# Altium footprint library FootPrintLib_0.PcbLib: 266 footprints (part 1 of 17)
Each footprint in its own frame and in the unit in brackets; x right, y up, seen from the top. Pads: shape width x height; smd on the part's side, far side on the other; paste and mask are expansions set on the pad; w line width, h text height; cw(c..) or ccw(c..) is an arc to the next point about the centre after c.
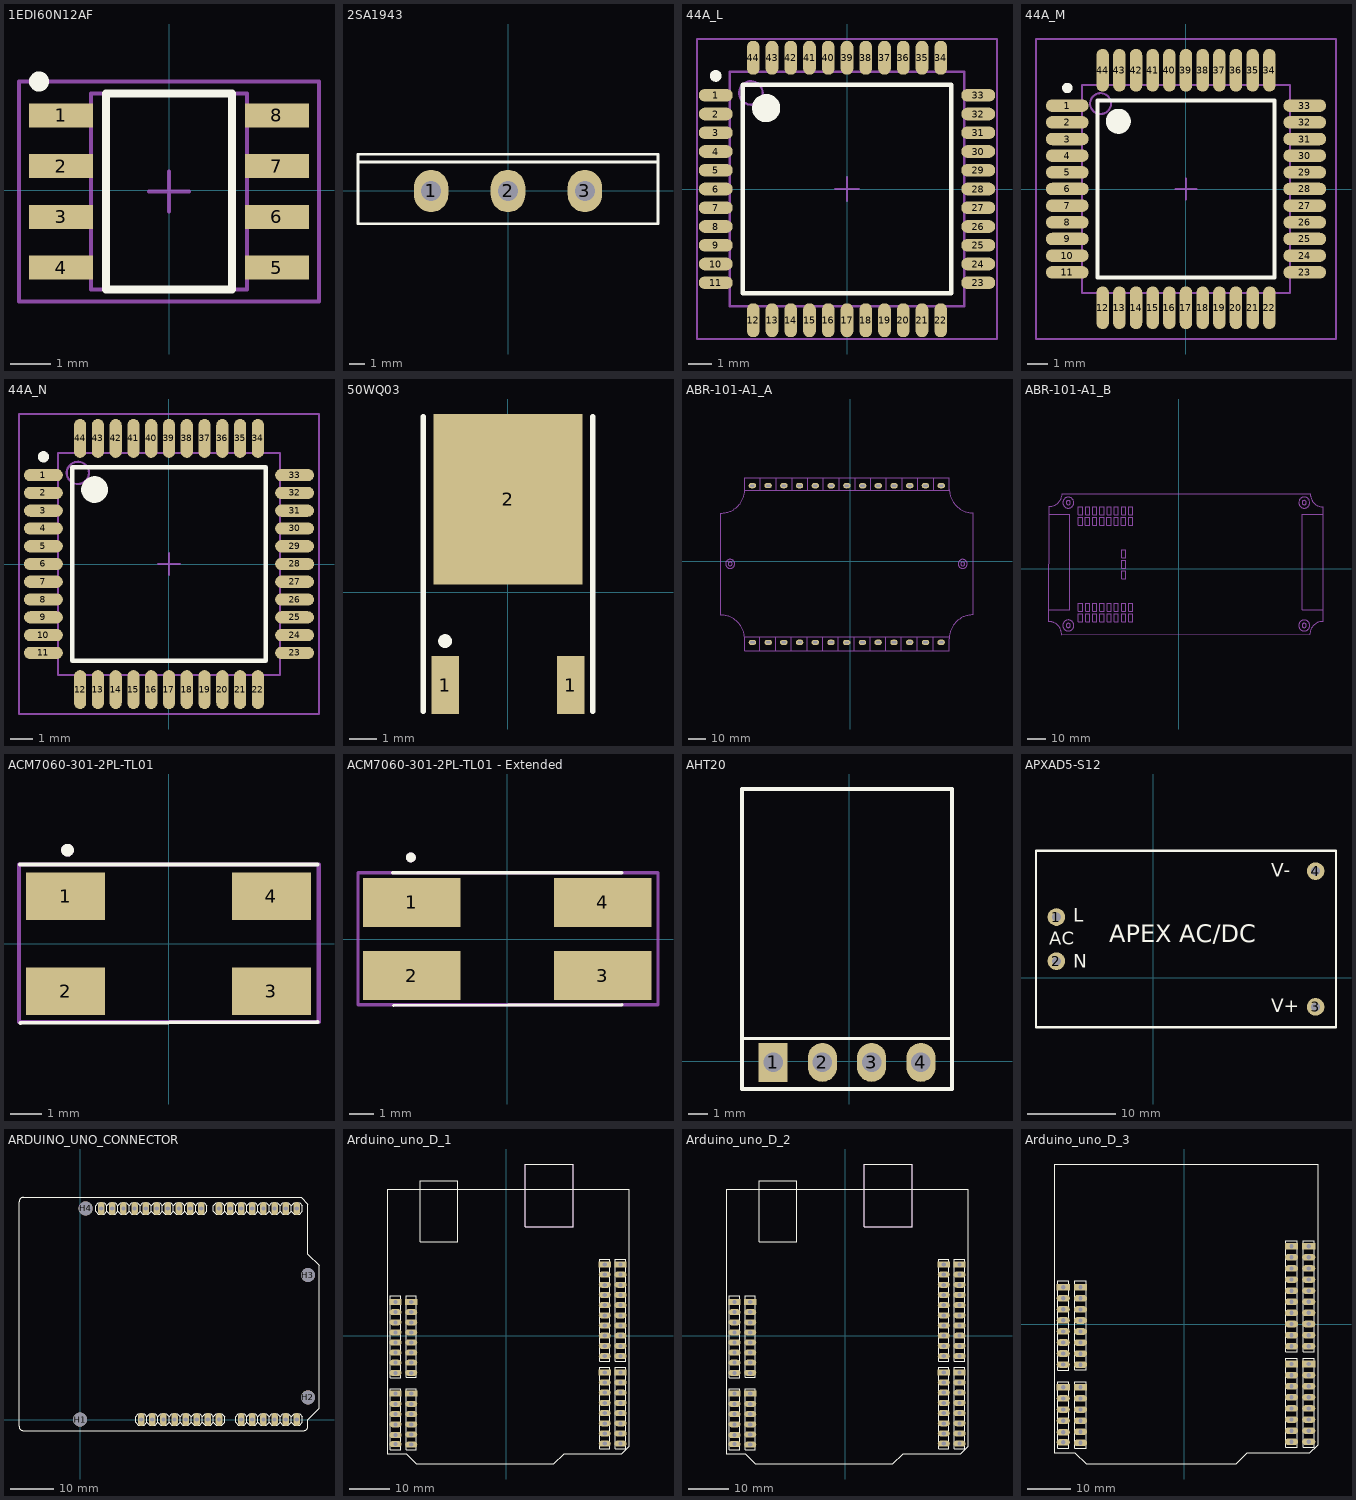
[diagram p0: the footprints below, top view; thin cyan lines are the x and y axes]

## 1EDI60N12AF [mm]
height 1.75
pads (8):
  rect 1.6x0.6 smd paste+0 mask+0: 1(-2.7,1.88) 2(-2.7,0.61) 3(-2.7,-0.66) 4(-2.7,-1.93) 5(2.7,-1.93) 6(2.7,-0.66) 7(2.7,0.61) 8(2.7,1.88)
Top Overlay:
  circle w0.25: c-3.25,2.725 r0.125
  lines w0.2: -1.575,-2.475 -1.575,2.425 1.575,2.425 1.575,-2.475 -1.575,-2.475
Mechanical 13:
  lines w0.1: -1.95,-2.475 -1.95,2.425 1.95,2.425 1.95,-2.475 -1.95,-2.475
Mechanical 15:
  lines w0.1: -0.5,-0.025 0.5,-0.025 ; 0,-0.525 0,0.475 ; -3.75,-2.775 -3.75,2.725 3.75,2.725 3.75,-2.775 -3.75,-2.775
3D body "DSO-8-16.stp": height 1.76, standoff 0, extent -3,-2.525 3,2.475

## 2SA1943 [mil]
pads (3):
  oval 90x110 hole 51.18: 1(-200,0) 2(0,0) 3(200,0)
Top Overlay:
  lines w7: -390,75 390,75 ; -390,-85 -390,95 390,95 390,-85 -390,-85
3D body "User Library-2SA1943.step": height 1445.85, standoff -364.35, extent -401.08,-104.72 406,100

## 44A_L [mm] "Thin QFP, 44-Leads, Body 10x10mm, Pitch 0.8mm, IPC High Density"
height 1.2
pads (44):
  oval 1.45x0.55 smd: 1(-5.6,4) 2(-5.6,3.2) 3(-5.6,2.4) 4(-5.6,1.6) 5(-5.6,0.8) 6(-5.6,0) 7(-5.6,-0.8) 8(-5.6,-1.6) 9(-5.6,-2.4) 10(-5.6,-3.2) 11(-5.6,-4) 23(5.6,-4) 24(5.6,-3.2) 25(5.6,-2.4) 26(5.6,-1.6) 27(5.6,-0.8) 28(5.6,0) 29(5.6,0.8) 30(5.6,1.6) 31(5.6,2.4) 32(5.6,3.2) 33(5.6,4)
  oval 0.55x1.45 smd: 12(-4,-5.6) 13(-3.2,-5.6) 14(-2.4,-5.6) 15(-1.6,-5.6) 16(-0.8,-5.6) 17(0,-5.6) 18(0.8,-5.6) 19(1.6,-5.6) 20(2.4,-5.6) 21(3.2,-5.6) 22(4,-5.6) 34(4,5.6) 35(3.2,5.6) 36(2.4,5.6) 37(1.6,5.6) 38(0.8,5.6) 39(0,5.6) 40(-0.8,5.6) 41(-1.6,5.6) 42(-2.4,5.6) 43(-3.2,5.6) 44(-4,5.6)
Top Overlay:
  circle w0.25: c-5.6,4.825 r0.125
  circle w0.6: c-3.45,3.45 r0.3
  lines w0.2: -4.45,-4.45 -4.45,4.45 4.45,4.45 4.45,-4.45 -4.45,-4.45
Mechanical 13:
  circle w0.1: c-4.1,4.1 r0.5
  lines w0.1: -5,-5 -5,5 5,5 5,-5 -5,-5
Mechanical 15:
  lines w0.1: -0.5,0 0.5,0 ; 0,-0.5 0,0.5 ; -6.4,-6.4 -6.4,6.4 6.4,6.4 6.4,-6.4 -6.4,-6.4
3D body "User Library-LQFP 44.step": height 2.9, standoff -0.03, extent -6.4,-6.4 6.4,6.4

## 44A_M [mm] "Thin QFP, 44-Leads, Body 10x10mm, Pitch 0.8mm, IPC Low Density"
height 1.2
pads (44):
  oval 2.05x0.6 smd: 1(-5.7,4) 2(-5.7,3.2) 3(-5.7,2.4) 4(-5.7,1.6) 5(-5.7,0.8) 6(-5.7,0) 7(-5.7,-0.8) 8(-5.7,-1.6) 9(-5.7,-2.4) 10(-5.7,-3.2) 11(-5.7,-4) 23(5.7,-4) 24(5.7,-3.2) 25(5.7,-2.4) 26(5.7,-1.6) 27(5.7,-0.8) 28(5.7,0) 29(5.7,0.8) 30(5.7,1.6) 31(5.7,2.4) 32(5.7,3.2) 33(5.7,4)
  oval 0.6x2.05 smd: 12(-4,-5.7) 13(-3.2,-5.7) 14(-2.4,-5.7) 15(-1.6,-5.7) 16(-0.8,-5.7) 17(0,-5.7) 18(0.8,-5.7) 19(1.6,-5.7) 20(2.4,-5.7) 21(3.2,-5.7) 22(4,-5.7) 34(4,5.7) 35(3.2,5.7) 36(2.4,5.7) 37(1.6,5.7) 38(0.8,5.7) 39(0,5.7) 40(-0.8,5.7) 41(-1.6,5.7) 42(-2.4,5.7) 43(-3.2,5.7) 44(-4,5.7)
Top Overlay:
  circle w0.6: c-3.25,3.25 r0.3
  circle w0.25: c-5.7,4.85 r0.125
  lines w0.2: -4.25,-4.25 4.25,-4.25 4.25,4.25 -4.25,4.25 -4.25,-4.25
Mechanical 13:
  circle w0.1: c-4.1,4.1 r0.5
  lines w0.1: -5,-5 5,-5 5,5 -5,5 -5,-5
Mechanical 15:
  lines w0.1: -0.5,0 0.5,0 ; 0,-0.5 0,0.5 ; -7.2,-7.2 7.2,-7.2 7.2,7.2 -7.2,7.2 -7.2,-7.2
3D body "User Library-LQFP 44.step": height 2.9, standoff -0.03, extent -6.425,-6.4 6.375,6.4

## 44A_N [mm] "Thin QFP, 44-Leads, Body 10x10mm, Pitch 0.8mm, IPC Medium Density"
height 1.2
pads (44):
  oval 1.75x0.55 smd: 1(-5.65,4) 2(-5.65,3.2) 3(-5.65,2.4) 4(-5.65,1.6) 5(-5.65,0.8) 6(-5.65,0) 7(-5.65,-0.8) 8(-5.65,-1.6) 9(-5.65,-2.4) 10(-5.65,-3.2) 11(-5.65,-4) 23(5.65,-4) 24(5.65,-3.2) 25(5.65,-2.4) 26(5.65,-1.6) 27(5.65,-0.8) 28(5.65,0) 29(5.65,0.8) 30(5.65,1.6) 31(5.65,2.4) 32(5.65,3.2) 33(5.65,4)
  oval 0.55x1.75 smd: 12(-4,-5.65) 13(-3.2,-5.65) 14(-2.4,-5.65) 15(-1.6,-5.65) 16(-0.8,-5.65) 17(0,-5.65) 18(0.8,-5.65) 19(1.6,-5.65) 20(2.4,-5.65) 21(3.2,-5.65) 22(4,-5.65) 34(4,5.65) 35(3.2,5.65) 36(2.4,5.65) 37(1.6,5.65) 38(0.8,5.65) 39(0,5.65) 40(-0.8,5.65) 41(-1.6,5.65) 42(-2.4,5.65) 43(-3.2,5.65) 44(-4,5.65)
Top Overlay:
  circle w0.25: c-5.65,4.825 r0.125
  circle w0.6: c-3.35,3.35 r0.3
  lines w0.2: -4.35,-4.35 -4.35,4.35 4.35,4.35 4.35,-4.35 -4.35,-4.35
Mechanical 13:
  circle w0.1: c-4.1,4.1 r0.5
  lines w0.1: -5,-5 -5,5 5,5 5,-5 -5,-5
Mechanical 15:
  lines w0.1: -0.5,0 0.5,0 ; 0,-0.5 0,0.5 ; -6.75,-6.75 -6.75,6.75 6.75,6.75 6.75,-6.75 -6.75,-6.75
3D body "User Library-LQFP 44.step": height 2.9, standoff -0.03, extent -6.374,-6.4 6.426,6.4

## 50WQ03 [mm] "D-PAK/TO-252-AA; 3 Leads (1 Cropped); Body 10.1 (inc. leads) x 6.6 mm (LxW max)"
pads (3):
  rect 1x2.1 smd: 1(-2.285,-3.375) 1(2.285,-3.375)
  rect 5.4x6.2 smd: 2(0,3.375)
Top Overlay:
  circle w0.25: c-2.285,-1.775 r0.125
  lines w0.2: -3.085,-4.325 -3.085,6.375 ; 3.085,-4.325 3.085,6.375
3D body "User Library-DPAK-1.step": height 2.39, standoff -0.02, extent -3.27,-4.111 3.27,5.827

## ABR-101-A1_A [mm]
pads (130):
  round 3 hole 1.4: 1(-56.538,43.161) 1(-56.284,43.161) 1(-55.903,43.161) 1(-55.649,43.161) 1(-55.268,43.161) 2(-47.521,43.186) 2(-47.267,43.186) 2(-46.886,43.186) 2(-46.632,43.186) 2(-46.251,43.186) 3(-38.504,43.161) 3(-38.25,43.161) 3(-37.869,43.161) 3(-37.615,43.161) 3(-37.234,43.161) 4(-29.538,43.135) 4(-29.284,43.135) 4(-28.903,43.135) 4(-28.649,43.135) 4(-28.268,43.135) 5(-20.444,43.135) 5(-20.19,43.135) 5(-19.809,43.135) 5(-19.555,43.135) 5(-19.174,43.135) 6(-11.453,43.11) 6(-11.199,43.11) 6(-10.818,43.11) 6(-10.564,43.11) 6(-10.183,43.11) 7(-2.41,43.161) 7(-2.156,43.161) 7(-1.775,43.161) 7(-1.521,43.161) 7(-1.14,43.161) 8(6.556,43.084) 8(6.81,43.084) 8(7.191,43.084) 8(7.445,43.084) 8(7.826,43.084) 9(15.547,43.11) 9(15.801,43.11) 9(16.182,43.11) 9(16.436,43.11) 9(16.817,43.11) 10(24.564,43.087) 10(24.818,43.087) 10(25.199,43.087) 10(25.453,43.087) 10(25.834,43.087) 11(33.581,43.161) 11(33.835,43.161) 11(34.216,43.161) 11(34.47,43.161) 11(34.851,43.161) 12(42.548,43.135) 12(42.802,43.135) 12(43.183,43.135) 12(43.437,43.135) 12(43.818,43.135) 13(51.565,43.161) 13(51.819,43.161) 13(52.2,43.161) 13(52.454,43.161) 13(52.835,43.161) 14(-56.49,-46.584) 14(-56.236,-46.584) 14(-55.855,-46.584) 14(-55.601,-46.584) 14(-55.22,-46.584) 15(-47.447,-46.584) 15(-47.193,-46.584) 15(-46.812,-46.584) 15(-46.558,-46.584) 15(-46.177,-46.584) 16(-38.532,-46.558) 16(-38.278,-46.558) 16(-37.897,-46.558) 16(-37.643,-46.558) 16(-37.262,-46.558) 17(-29.489,-46.533) 17(-29.235,-46.533) 17(-28.854,-46.533) 17(-28.6,-46.533) 17(-28.219,-46.533) 18(-20.498,-46.558) 18(-20.244,-46.558) 18(-19.863,-46.558) 18(-19.609,-46.558) 18(-19.228,-46.558) 19(-11.506,-46.533) 19(-11.252,-46.533) 19(-10.871,-46.533) 19(-10.617,-46.533) 19(-10.236,-46.533) 20(-2.54,-46.609) 20(-2.286,-46.609) 20(-1.905,-46.609) 20(-1.651,-46.609) 20(-1.27,-46.609) 21(6.502,-46.558) 21(6.756,-46.558) 21(7.137,-46.558) 21(7.391,-46.558) 21(7.772,-46.558) 22(15.443,-46.533) 22(15.697,-46.533) 22(16.078,-46.533) 22(16.332,-46.533) 22(16.713,-46.533) 23(24.536,-46.533) 23(24.79,-46.533) 23(25.171,-46.533) 23(25.425,-46.533) 23(25.806,-46.533) 24(33.528,-46.533) 24(33.782,-46.533) 24(34.163,-46.533) 24(34.417,-46.533) 24(34.798,-46.533) 25(42.596,-46.558) 25(42.85,-46.558) 25(43.231,-46.558) 25(43.485,-46.558) 25(43.866,-46.558) 26(51.537,-46.533) 26(51.791,-46.533) 26(52.172,-46.533) 26(52.426,-46.533) 26(52.807,-46.533)
Mechanical 1:
  circle w0.3: c64.491,-1.651 r2.576
  circle w0.3: c64.491,-1.651 r1.128
  circle w0.3: c-68.605,-1.6 r1.128
  circle w0.3: c-68.605,-1.6 r2.576
  lines w0.3: -73.902,-30.96 -73.902,27.384 ; -73.851,-31.001 cw(c-73.927,-44.65) -60.288,-44.142 ; -73.851,27.46 ccw(c-73.851,41.151) -60.161,41.075 ; -60.297,-43.777 -60.297,-51.333 56.744,-51.333 56.744,-44.475 ; -60.239,-43.449 56.718,-43.449 ; -60.148,41.236 -60.148,47.574 ; -60.122,40.502 56.718,40.502 ; -60.122,47.574 -60.056,47.64 56.854,47.64 56.854,40.64 ; -51.578,-51.268 -51.578,-43.518 ; -51.274,40.548 -51.274,47.548 ; -42.58,-51.268 -42.58,-43.518 ; -42.126,40.548 -42.126,47.548 ; -33.582,-51.268 -33.582,-43.518 ; -33.128,40.548 -33.128,47.548 ; -24.434,-51.308 -24.434,-43.668 ; -24.13,40.548 -24.13,47.548 ; -15.586,-51.268 -15.586,-43.518 ; -15.281,40.548 -15.281,47.548 ; -6.587,-51.268 -6.587,-43.518 ; -6.133,40.548 -6.133,47.548 ; 2.411,-51.268 2.411,-43.518 ; 2.865,40.548 2.865,47.548 ; 11.559,-51.418 11.559,-43.536 ; 11.863,40.548 11.863,47.548 ; 20.407,-51.268 20.407,-43.518 ; 20.711,40.548 20.711,47.548 ; 29.405,-51.268 29.405,-43.518 ; 29.859,40.548 29.859,47.548 ; 38.403,-51.268 38.403,-43.518 ; 38.857,40.548 38.857,47.548 ; 47.551,-51.308 47.551,-43.51 ; 47.855,40.548 47.855,47.548 ; 56.744,-44.45 cw(c70.434,-44.526) 70.434,-30.835 ; 56.845,40.767 ccw(c70.485,41.275) 70.409,27.626 ; 70.434,-30.759 70.434,27.584

## ABR-101-A1_B [mm]
Mechanical 1:
  drawing of 162 lines, arcs and shapes, not listed

## ACM7060-301-2PL-TL01 [mm]
pads (4):
  rect 2.5x1.5 smd: 1(-3.25,1.5) 2(-3.25,-1.5) 3(3.25,-1.5) 4(3.25,1.5)
Top Overlay:
  circle w0.2: c-3.191,2.962 r0.1
  lines w0.127: -4.698,2.513 4.7,2.513 ; -4.672,-2.491 4.7,-2.465
Mechanical 13:
  circle w0.2: c-3.191,2.962 r0.1
  lines w0.127: -4.723,-2.465 -4.723,2.513 4.751,2.513 4.751,-2.465 -4.723,-2.465
Mechanical 15:
  lines w0.05: -4.698,-2.465 4.7,-2.465 4.7,2.513 -4.698,2.513 -4.698,-2.465

## ACM7060-301-2PL-TL01 - Extended [mm]
pads (4):
  rect 4x2 smd: 1(-3.91,1.5) 2(-3.91,-1.5) 3(3.91,-1.5) 4(3.91,1.5)
Top Overlay:
  circle w0.2: c-3.953,3.343 r0.1
  lines w0.127: -4.698,2.716 4.7,2.716 ; -4.672,-2.719 4.7,-2.694
Mechanical 13:
  circle w0.2: c-3.953,3.343 r0.1
  lines w0.127: -6.12,-2.694 -6.12,2.716 6.173,2.716 6.173,-2.694 -6.12,-2.694
Mechanical 15:
  lines w0.05: -6.12,-2.719 -6.12,2.716 6.148,2.716 6.148,-2.719 -6.12,-2.719

## AHT20 [mm]
pads (4):
  rect 1.5x2 hole 1: 1(-3.937,-0.051)
  oval 1.5x2 hole 1: 2(-1.397,-0.051) 3(1.143,-0.051) 4(3.683,-0.051)
Top Overlay:
  lines w0.2: -5.537,14.046 -5.537,-1.422 5.283,-1.422 5.283,14.046 -5.512,14.046 ; -5.486,1.194 5.232,1.168
3D body "AHT0 module v3.step": height 7.4, standoff 4.3, extent -5.527,-1.35 5.273,14.05
3D body "61300411121.stp": height 7.27, standoff -4.27, extent -5.182,-1.473 4.978,1.067

## APXAD5-S12 [mm]
pads (4):
  round 2 hole 1: 1(-10.998,6.858) 2(-10.998,1.854) 3(18.39,-3.327) 4(18.39,12.065)
Top Overlay:
  lines w0.254: -13.31,-5.639 20.701,-5.639 ; -13.31,-5.486 -13.31,14.376 -2.87,14.376 20.574,14.376 ; 20.701,-5.486 20.701,14.376
  text "AC" at -11.816,3.721 h1.5
  text "V+" at 13.386,-3.937 h1.52
  text "V-" at 13.386,11.43 h1.52
  text "N" at -9.093,1.092 h1.52
  text "L" at -9.093,6.325 h1.52
  text "APEX AC/DC" at -4.991,4.004 h2
3D body "User Library-hilink.step": height 15.01, standoff -5, extent -13.292,-5.655 20.708,14.545

## ARDUINO_UNO_CONNECTOR [mm] "Arduino Uno Connector"
pads (36):
  oval 1.5x3 hole 1: AD1(36.83,0) AD2(39.37,0) AD3(41.91,0) AD4(44.45,0) AD5(46.99,0) AD6(49.53,0) IOH1(27.686,48.26) IOH2(25.146,48.26) IOH3(22.606,48.26) IOH4(20.066,48.26) IOH5(17.526,48.26) IOH6(14.986,48.26) IOH7(12.446,48.26) IOH8(9.906,48.26) IOH9(7.366,48.26) IOH10(4.826,48.26) IOL1(49.53,48.26) IOL2(46.99,48.26) IOL3(44.45,48.26) IOL4(41.91,48.26) IOL5(39.37,48.26) IOL6(36.83,48.26) IOL7(34.29,48.26) IOL8(31.75,48.26) POW1(13.97,0) POW2(16.51,0) POW3(19.05,0) POW4(21.59,0) POW5(24.13,0) POW6(26.67,0) POW7(29.21,0) POW8(31.75,0)
  round 3.2 hole 3.2: H1(0,0) H2(52.07,5.08) H3(52.07,33.02) H4(1.27,48.26)
Top Overlay:
  drawing of 240 lines, arcs and shapes, not listed
3D body "61301011821.stp": height 8.55, standoff -3.06, extent 3.306,47.036 29.206,49.536
3D body "61300811821.stp": height 8.55, standoff -3.06, extent 30.306,46.985 51.126,49.485
3D body "61300811821.stp": height 8.55, standoff -3.06, extent 12.196,-1.148 33.016,1.352
3D body "61300611821.stp": height 8.55, standoff -3.06, extent 35.361,-1.148 51.101,1.352

## Arduino_uno_D_1 [mm]
pads (64):
  rect 3x1.5 hole 1: 1(-27.686,8.382) 1(-23.749,8.382) 9(-27.686,-14.478) 9(-23.749,-14.478) 22(24.511,-9.144) 22(28.448,-9.144) 32(24.511,17.78) 32(28.448,17.78)
  oval 3x1.5 hole 1: 2(-27.686,5.86) 2(-23.749,5.86) 3(-27.686,3.338) 3(-23.749,3.338) 4(-27.686,0.816) 4(-23.749,0.816) 5(-27.686,-1.705) 5(-23.749,-1.705) 6(-27.686,-4.227) 6(-23.749,-4.227) 7(-27.686,-6.749) 7(-23.749,-6.749) 8(-27.686,-9.271) 8(-23.749,-9.271) 10(-27.686,-17.018) 10(-23.749,-17.018) 11(-27.686,-19.558) 11(-23.749,-19.558) 12(-27.686,-22.098) 12(-23.749,-22.098) 13(-27.686,-24.765) 13(-23.749,-24.638) 14(-27.686,-27.051) 14(-23.749,-27.178) 15(24.511,-26.924) 15(28.448,-26.924) 16(24.511,-24.384) 16(28.448,-24.384) 17(24.511,-21.844) 17(28.448,-21.844) 18(24.511,-19.304) 18(28.448,-19.304) 19(24.511,-16.764) 19(28.448,-16.764) 20(24.511,-14.224) 20(28.448,-14.224) 21(24.511,-11.684) 21(28.448,-11.684) 23(24.511,-5.08) 23(28.448,-5.08) 24(24.511,-2.54) 24(28.448,-2.54) 25(24.511,0) 25(28.448,0) 26(24.511,2.54) 26(28.448,2.54) 27(24.511,5.08) 27(28.448,5.08) 28(24.511,7.62) 28(28.448,7.62) 29(24.511,10.16) 29(28.448,10.16) 30(24.511,12.7) 30(28.448,12.7) 31(24.511,15.24) 31(28.448,15.24)
Top Overlay:
  lines w0.127: -29.718,-29.464 -29.718,36.576 30.48,36.576 30.48,-27.686 28.702,-29.464 14.351,-29.464 11.811,-32.004 -22.479,-32.004 -25.019,-29.464 -29.718,-29.464
  lines w0.2: -21.537,29.208 -21.537,38.608 -12.137,38.608 -12.137,23.408 -19.05,23.408 ; -21.537,29.21 -21.537,23.408 -18.987,23.408 ; 4.648,34.839 4.648,42.819 16.688,42.819 16.688,34.839 ; 4.648,35.56 4.648,27.109 8.218,27.109 ; 8.128,27.109 16.688,27.109 16.688,34.798 ; 10.618,27.109 10.958,27.109 ; -25.019,-28.448 -25.019,-13.208 -22.479,-13.208 -22.479,-28.448 -25.019,-28.448 ; -25.019,-10.414 -25.019,9.906 -22.479,9.906 -22.479,-10.414 -25.019,-10.414 ; 23.241,-28.194 23.241,-7.874 25.781,-7.874 25.781,-28.194 23.241,-28.194 ; 23.241,-6.35 23.241,-1.27 23.241,19.05 25.781,19.05 25.781,-1.27 25.781,-6.35 23.241,-6.35
  lines w0.254: -28.956,-28.448 -28.956,-15.748 -28.956,-13.208 -27.686,-13.208 -26.416,-13.208 -26.416,-15.748 -26.416,-28.448 -28.956,-28.448 ; -28.956,-10.541 -28.956,9.906 -26.416,9.906 -26.416,-10.541 -28.956,-10.541 ; 27.178,-28.194 29.718,-28.194 29.718,-7.874 27.178,-7.874 27.178,-28.194 ; 27.178,-6.35 27.178,-3.81 27.178,19.05 29.718,19.05 29.718,-3.81 29.718,-6.35 27.178,-6.35
Mechanical 13:
  lines w0.1: 4.648,27.109 4.648,42.819 16.688,42.819 16.688,27.109 4.648,27.109
3D body "header 8.STEP": height 8.51, standoff -3.68, extent -25.009,-10.409 -22.479,9.901
3D body "header 8.STEP": height 8.51, standoff -3.68, extent 23.251,-28.194 25.781,-7.884
3D body "header 6.STEP": height 8.51, standoff -3.68, extent -25.019,-28.311 -22.489,-13.081
3D body "header 8.STEP": height 8.51, standoff -3.68, extent 23.241,-1.26 25.771,19.05
3D body "header 2.STEP": height 8.51, standoff -3.68, extent 23.241,-6.345 25.771,-1.275
3D body "61301011821.stp": height 8.55, standoff -3.06, extent 27.213,-6.564 29.713,19.336
3D body "61300811821.stp": height 8.55, standoff -3.06, extent 27.162,-28.484 29.662,-7.664
3D body "61300811821.stp": height 8.55, standoff -3.06, extent -28.86,-10.537 -26.36,10.283
3D body "61300611821.stp": height 8.55, standoff -3.06, extent -28.86,-28.622 -26.36,-12.882

## Arduino_uno_D_2 [mm]
pads (64):
  rect 3x1.5 hole 1: 1(-27.686,8.382) 1(-23.749,8.382) 9(-27.686,-14.478) 9(-23.749,-14.478) 22(24.511,-9.144) 22(28.448,-9.144) 32(24.511,17.78) 32(28.448,17.78)
  oval 3x1.5 hole 1: 2(-27.686,5.86) 2(-23.749,5.86) 3(-27.686,3.338) 3(-23.749,3.338) 4(-27.686,0.816) 4(-23.749,0.816) 5(-27.686,-1.705) 5(-23.749,-1.705) 6(-27.686,-4.227) 6(-23.749,-4.227) 7(-27.686,-6.749) 7(-23.749,-6.749) 8(-27.686,-9.271) 8(-23.749,-9.271) 10(-27.686,-17.018) 10(-23.749,-17.018) 11(-27.686,-19.558) 11(-23.749,-19.558) 12(-27.686,-22.098) 12(-23.749,-22.098) 13(-27.686,-24.765) 13(-23.749,-24.638) 14(-27.686,-27.051) 14(-23.749,-27.178) 15(24.511,-26.924) 15(28.448,-26.924) 16(24.511,-24.384) 16(28.448,-24.384) 17(24.511,-21.844) 17(28.448,-21.844) 18(24.511,-19.304) 18(28.448,-19.304) 19(24.511,-16.764) 19(28.448,-16.764) 20(24.511,-14.224) 20(28.448,-14.224) 21(24.511,-11.684) 21(28.448,-11.684) 23(24.511,-5.08) 23(28.448,-5.08) 24(24.511,-2.54) 24(28.448,-2.54) 25(24.511,0) 25(28.448,0) 26(24.511,2.54) 26(28.448,2.54) 27(24.511,5.08) 27(28.448,5.08) 28(24.511,7.62) 28(28.448,7.62) 29(24.511,10.16) 29(28.448,10.16) 30(24.511,12.7) 30(28.448,12.7) 31(24.511,15.24) 31(28.448,15.24)
Top Overlay:
  lines w0.127: -29.718,-29.464 -25.019,-29.464 -22.479,-32.004 11.811,-32.004 14.351,-29.464 28.702,-29.464 30.48,-27.686 30.48,36.576 -29.718,36.576 -29.718,-29.464
  lines w0.2: -21.537,29.208 -21.537,38.608 -12.137,38.608 -12.137,23.408 -19.05,23.408 ; -21.537,29.21 -21.537,23.408 -18.987,23.408 ; 4.648,34.839 4.648,42.819 16.688,42.819 16.688,34.839 ; 4.648,35.56 4.648,27.109 8.218,27.109 ; 8.128,27.109 16.688,27.109 16.688,34.798 ; 10.618,27.109 10.958,27.109 ; -25.019,-28.448 -22.479,-28.448 -22.479,-13.208 -25.019,-13.208 -25.019,-28.448 ; -25.019,-10.414 -22.479,-10.414 -22.479,9.906 -25.019,9.906 -25.019,-10.414 ; 23.241,-28.194 25.781,-28.194 25.781,-7.874 23.241,-7.874 23.241,-28.194 ; 23.241,-6.35 25.781,-6.35 25.781,-1.27 25.781,19.05 23.241,19.05 23.241,-1.27 23.241,-6.35
  lines w0.254: -28.956,-28.448 -26.416,-28.448 -26.416,-15.748 -26.416,-13.208 -27.686,-13.208 -28.956,-13.208 -28.956,-15.748 -28.956,-28.448 ; -28.956,-10.541 -26.416,-10.541 -26.416,9.906 -28.956,9.906 -28.956,-10.541 ; 27.178,-28.194 27.178,-7.874 29.718,-7.874 29.718,-28.194 27.178,-28.194 ; 27.178,-6.35 29.718,-6.35 29.718,-3.81 29.718,19.05 27.178,19.05 27.178,-3.81 27.178,-6.35
Mechanical 13:
  lines w0.1: 4.648,27.109 16.688,27.109 16.688,42.819 4.648,42.819 4.648,27.109

## Arduino_uno_D_3 [mm]
pads (64):
  rect 3x1.5 hole 1: 1(-27.686,8.382) 1(-23.749,8.37) 9(-27.686,-14.478) 9(-23.749,-14.478) 22(24.511,-9.144) 22(28.448,-9.144) 32(24.511,17.78) 32(28.448,17.78)
  oval 3x1.5 hole 1: 2(-27.686,5.86) 2(-23.749,5.848) 3(-27.686,3.338) 3(-23.749,3.326) 4(-27.686,0.816) 4(-23.749,0.804) 5(-27.686,-1.705) 5(-23.749,-1.717) 6(-27.686,-4.227) 6(-23.749,-4.239) 7(-27.686,-6.749) 7(-23.749,-6.761) 8(-27.686,-9.271) 8(-23.749,-9.283) 10(-27.686,-17.018) 10(-23.749,-17.018) 11(-27.686,-19.558) 11(-23.749,-19.558) 12(-27.686,-22.098) 12(-23.749,-22.098) 13(-27.686,-24.765) 13(-23.749,-24.638) 14(-27.686,-27.051) 14(-23.749,-27.178) 15(24.511,-26.924) 15(28.448,-26.924) 16(24.511,-24.384) 16(28.448,-24.384) 17(24.511,-21.844) 17(28.448,-21.844) 18(24.511,-19.304) 18(28.448,-19.304) 19(24.511,-16.764) 19(28.448,-16.764) 20(24.511,-14.224) 20(28.448,-14.224) 21(24.511,-11.684) 21(28.448,-11.684) 23(24.511,-5.08) 23(28.448,-5.08) 24(24.511,-2.54) 24(28.448,-2.54) 25(24.511,0) 25(28.448,0) 26(24.511,2.54) 26(28.448,2.54) 27(24.511,5.08) 27(28.448,5.08) 28(24.511,7.62) 28(28.448,7.62) 29(24.511,10.16) 29(28.448,10.16) 30(24.511,12.7) 30(28.448,12.7) 31(24.511,15.24) 31(28.448,15.24)
Top Overlay:
  lines w0.127: -29.718,-29.464 -25.019,-29.464 -22.479,-32.004 11.811,-32.004 14.351,-29.464 28.702,-29.464 30.48,-27.686 30.48,36.576 -29.718,36.576 -29.718,-29.464
  lines w0.2: -25.019,-28.448 -22.479,-28.448 -22.479,-13.208 -25.019,-13.208 -25.019,-28.448 ; -25.019,-10.516 -22.479,-10.516 -22.479,9.906 -25.019,9.906 -25.019,-10.516 ; 23.241,-28.194 25.781,-28.194 25.781,-7.874 23.241,-7.874 23.241,-28.194 ; 23.241,-6.35 25.781,-6.35 25.781,-1.27 25.781,19.05 23.241,19.05 23.241,-1.27 23.241,-6.35
  lines w0.254: -28.956,-28.448 -26.416,-28.448 -26.416,-15.748 -26.416,-13.208 -27.686,-13.208 -28.956,-13.208 -28.956,-15.748 -28.956,-28.448 ; -28.956,-10.541 -26.416,-10.541 -26.416,9.906 -28.956,9.906 -28.956,-10.541 ; 27.178,-28.194 27.178,-7.874 29.718,-7.874 29.718,-28.194 27.178,-28.194 ; 27.178,-6.35 29.718,-6.35 29.718,-3.81 29.718,19.05 27.178,19.05 27.178,-3.81 27.178,-6.35
3D body "header 2.STEP": height 8.51, standoff -3.68, extent 23.241,-6.345 25.771,-1.275
3D body "header 8.STEP": height 8.51, standoff -3.68, extent 23.241,-1.26 25.771,19.05
3D body "header 6.STEP": height 8.51, standoff -3.68, extent -25.019,-28.311 -22.489,-13.081
3D body "header 8.STEP": height 8.51, standoff -3.68, extent 23.251,-28.194 25.781,-7.884
3D body "header 8.STEP": height 8.51, standoff -3.68, extent -25.009,-10.409 -22.479,9.901
3D body "61301011821.stp": height 8.55, standoff -3.06, extent 27.187,-6.564 29.687,19.336
3D body "61300811821.stp": height 8.55, standoff -3.06, extent 27.136,-28.484 29.636,-7.664
3D body "61300811821.stp": height 8.55, standoff -3.06, extent -28.987,-10.588 -26.487,10.232
3D body "61300611821.stp": height 8.55, standoff -3.06, extent -28.987,-28.673 -26.487,-12.933